# Altium schematic symbol library Schlib1.SchLib: 8 symbols
Pins are listed as number, name and electrical type; pins without a type are passive.

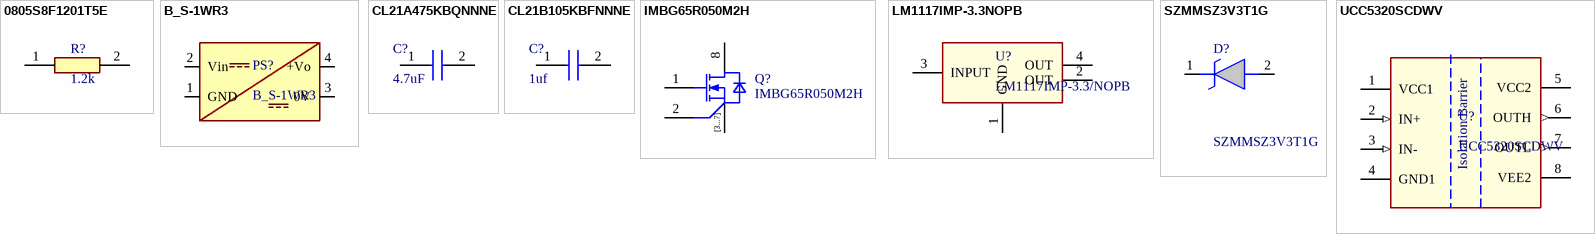
[diagram p0: symbols 0805S8F1201T5E to UCC5320SCDWV]

## 0805S8F1201T5E
designator R?, comment 1.2k
Manufacturer_Name: ROYALOHM; Manufacturer_Part_Number: 0805S8F1201T5E; Datasheet Link: https://www.ozdisan.com/api/pdf/product/assets/general_royalohm.pdf; Özdisan_Stock: https://www.ozdisan.com/p/smt-smd-ve-cip-direncler-194/royalohm-0805s8f1201t5e-335036; Value: 1.2k
footprint CAPC2012X140N
pins: 1, 2

## B_S-1WR3
designator PS?
Datasheet_Link: https://www.mornsun-power.com/html/pdf/B1224S-1WR3.html; Supply_Link: https://www.motorobit.com/b1224s-1wr3-dc-dc-1w-108-132v-giris-24v-cikis-voltaj-donusturucu
footprint B_S-1WR3
pins: 1 GND, 2 Vin, 3 0V, 4 +Vo

## CL21A475KBQNNNE
designator C?, comment 4.7uF
Capacitor; Manufacturer_Name: SAMSUNG; Manufacturer_Part_Number: CL21A475KBQNNNE; Datasheet Link: https://ms.componentsearchengine.com/Datasheets/2/CL21A475KBQNNNE.pdf; Height: 1.4mm; Mouser Part Number: 187-CL21A475KBQNNNE; Mouser Price/Stock: https://www.mouser.co.uk/ProductDetail/Samsung-Electro-Mechanics/CL21A475KBQNNNE?qs=PrRfcuU4sMYF%2FNLy2b9Ujg%3D%3D; Arrow Part Number: CL21A475KBQNNNE; Arrow Price/Stock: https://www.arrow.com/en/products/cl21a475kbqnnne/samsung-electro-mechanics?utm_currency=USD&region=nac; Value: 4.7uF
footprint CAPC2012X140N
pins: 1, 2

## CL21B105KBFNNNE
designator C?, comment 1uf
Capacitor; Manufacturer_Name: SAMSUNG; Manufacturer_Part_Number: CL21B105KBFNNNE; Datasheet Link: https://componentsearchengine.com/Datasheets/2/CL21B105KBFNNNE.pdf; Height: 1.35mm; Mouser Part Number: 187-CL21B105KBFNNNE; Mouser Price/Stock: https://www.mouser.co.uk/ProductDetail/Samsung-Electro-Mechanics/CL21B105KBFNNNE?qs=yOVawPpwOwmddQEBPU6Y9A%3D%3D; Arrow Part Number: CL21B105KBFNNNE; Arrow Price/Stock: https://www.arrow.com/en/products/cl21b105kbfnnne/samsung-electro-mechanics.html?utm_currency=USD&region=nac; Value: 1uf
footprint CAPC2012X140N
pins: 1, 2

## IMBG65R050M2H
designator Q?
Insulated-Gate Field-Effect Transistor (IGFET), N-Channel, Enhancement, Body Diode, Pin 1 Gate, 2 Driver Source, 3 Power Source, 4 Power Source, 5 Power Source, 6 Power Source, 7 Power Source, 8 Drain, 8 Pins; Manufacturer: Infineon Technologies; Manufacturer Order Number: IMBG65R050M2H; PackageReference: PG-TO263-7-12
footprint TO127P1500X470-8N-2-V1 (TO,1.27mm pitch;7 pin,15.00mm L X 9.25mm W X 4.70mm H body)
pins: 1 GATE, 2 DRIVER SOURCE, 3 POWER SOURCE, 4 POWER SOURCE, 5 POWER SOURCE, 6 POWER SOURCE, 7 POWER SOURCE, 8 DRAIN
text: [3...7]

## LM1117IMP-3.3NOPB
designator U?, comment LM1117IMP-3.3/NOPB
800-mA 15-V linear voltage regulator 4-SOT-223 -40 to 125; Manufacturer_Name: Texas Instruments; TYPE: TYPE; RefDes: RefDes; Copyright: Copyright (C) 2025 Ultra Librarian. All rights reserved.; Manufacturer_Part_Number: LM1117IMP-3.3/NOPB; Datasheet: https://www.ti.com/lit/gpn/lm1117
footprint DCY0004A_M
pins: 1 GND (power), 2 OUT (power), 3 INPUT (power), 4 OUT (power)

## SZMMSZ3V3T1G
designator D?
500 mW Rating on FR-4 or FR-5 Board; Wide Zener Reverse Voltage Range - 2.4 V to 56 V; Package Designed for Optimal Automated Board Assembly; Small Package Size for High Density Applications; ESD Rating of Class 3 (exceeding 16 kV) per the Human Body Model Mechanical Characteristics:; CASE: Void-free, transfer-molded, thermosetting plastic case; FINISH: Corrosion resistant finish, easily solderable; MAXIMUM CASE TEMPERATURE FOR SOLDERING PURPOSES: 260C for 10 Seconds; POLARITY: Cathode indicated by polarit; Manufacturer_Name: onsemi; Geometry.Height: 1.35mm; Mouser Part Number: 863-SZMMSZ3V3T1G; Mouser Price/Stock: https://www.mouser.co.uk/ProductDetail/onsemi/SZMMSZ3V3T1G?qs=PJJcWtbOkNWDWixFbpUCfA%3D%3D; Manufacturer_Part_Number: SZMMSZ3V3T1G; Datasheet Link: https://www.onsemi.com/pub/Collateral/MMSZ2V4T1-D.PDF
footprint SOD3716X135N
pins: 1 K, 2 A

## UCC5320SCDWV
designator U?
3k/5kVrms, 2A/2A single-channel isolated gate driver with UVLO referenced to GND or split output 8-SOIC -40 to 125; Manufacturer_Name: Texas Instruments; TYPE: TYPE; RefDes: RefDes; Copyright: Copyright (C) 2025 Ultra Librarian. All rights reserved.; Manufacturer_Part_Number: UCC5320SCDWV; Datasheet: https://www.ti.com/lit/gpn/ucc5320
footprint DWV0008A
pins: 1 VCC1 (power), 2 IN+ (in), 3 IN- (in), 4 GND1 (power), 5 VCC2 (power), 6 OUTH (out), 7 OUTL (out), 8 VEE2 (power)
text: Isolation Barrier